# Altium footprint library SamacSys.PcbLib: 1008 footprints (part 41 of 63)
Each footprint in its own frame and in the unit in brackets; x right, y up, seen from the top. Pads: shape width x height; smd on the part's side, far side on the other; paste and mask are expansions set on the pad; w line width, h text height; cw(c..) or ccw(c..) is an arc to the next point about the centre after c.
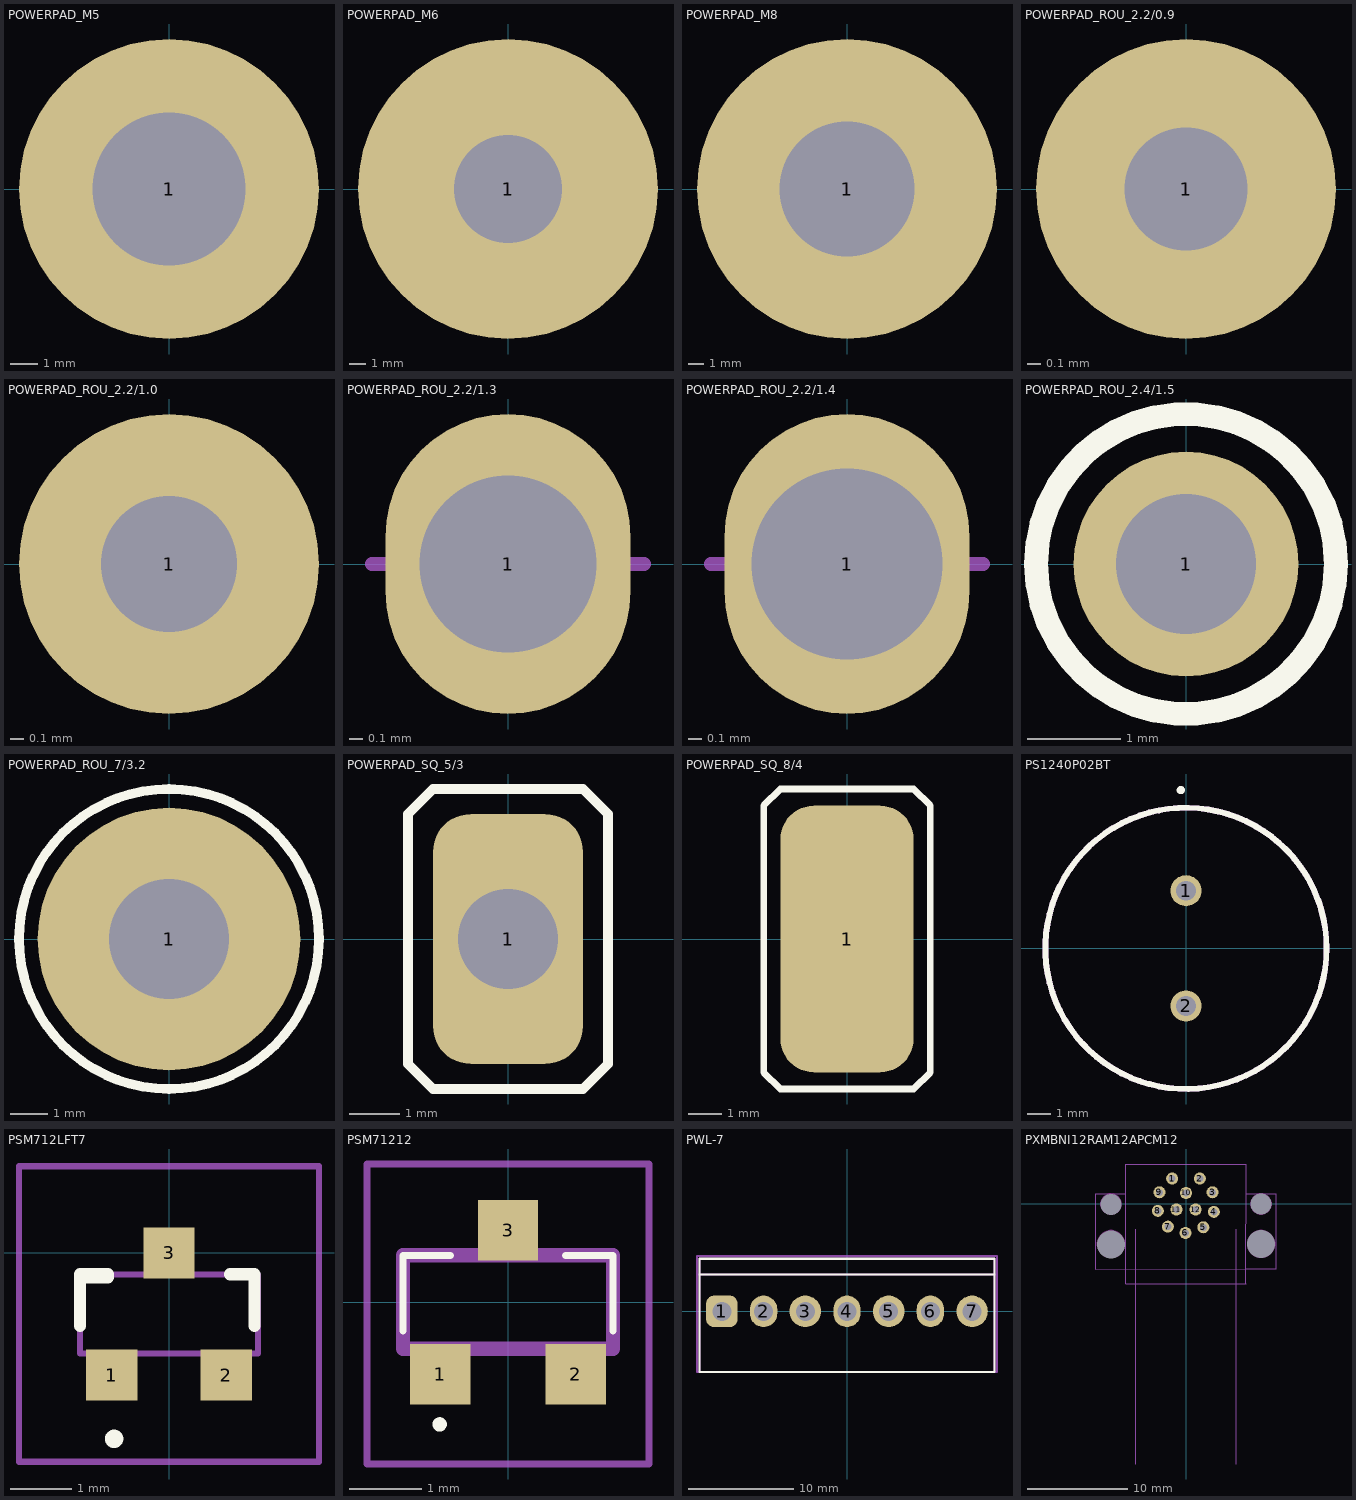
[diagram p40: the footprints below, top view; thin cyan lines are the x and y axes]

## POWERPAD_M5 [mm]
pads (1):
  round 11 hole 5.6 mask+0.5: 1(0,0)
Countryard:
  lines w0.1: -1,0 1,0 ; 0,-1 0,1
3D body: height 42, standoff 35, extent -5,-22.5 5,6.5
3D body: height 57, standoff -13, extent -2.489,-2.477 2.511,2.523

## POWERPAD_M6 [mm]
pads (1):
  round 18 hole 6.5 mask+0.5: 1(0,0)
Countryard:
  lines w0.1: -1,0 1,0 ; 0,-1 0,1
3D body "м6.STEP": height 62.94, standoff -17.06, extent -6,-6 6,5.976

## POWERPAD_M8 [mm]
pads (1):
  round 20 hole 9 mask+0.5: 1(0,0)
Countryard:
  lines w0.1: -1,0 1,0 ; 0,-1 0,1
3D body "м8.STEP": height 62.94, standoff -17.06, extent -8,-8 8,7.977
3D body "Cable Lug M8.step": height 54.7, standoff 40, extent -11.479,-9 35.5,9

## POWERPAD_ROU_2.2/0.9 [mm]
pads (1):
  round 2.2 hole 0.9: 1(0,0)
Countryard:
  lines w0.1: -1,0 1,0 ; 0,-1 0,1

## POWERPAD_ROU_2.2/1.0 [mm]
pads (1):
  round 2.2 hole 1: 1(0,0)
Countryard:
  lines w0.1: -1,0 1,0 ; 0,-1 0,1

## POWERPAD_ROU_2.2/1.3 [mm]
pads (1):
  oval 1.8x2.2 hole 1.3: 1(0,0)
Countryard:
  lines w0.1: -1,0 1,0 ; 0,-1 0,1

## POWERPAD_ROU_2.2/1.4 [mm]
pads (1):
  oval 1.8x2.2 hole 1.4: 1(0,0)
Countryard:
  lines w0.1: -1,0 1,0 ; 0,-1 0,1

## POWERPAD_ROU_2.4/1.5 [mm]
pads (1):
  round 2.4 hole 1.5: 1(0,0)
Top Overlay:
  circle w0.254: c0,0 r1.603
Countryard:
  lines w0.1: -1,0 1,0 ; 0,-1 0,1

## POWERPAD_ROU_7/3.2 [mm]
pads (1):
  round 7 hole 3.2: 1(0,0)
Top Overlay:
  circle w0.254: c0,0 r4
Countryard:
  lines w0.1: -1,0 1,0 ; 0,-1 0,1

## POWERPAD_SQ_5/3 [mm]
pads (1):
  rrect50% 3x5 hole 2: 1(0,0)
Top Overlay:
  lines w0.2: -2,-2.5 -2,2.5 -1.5,3 1.5,3 2,2.5 2,-2.5 1.5,-3 -1.5,-3 -2,-2.5
Countryard:
  lines w0.1: -1,0 1,0 ; 0,-1 0,1

## POWERPAD_SQ_8/4 [mm]
pads (1):
  rrect50% 4x8 smd: 1(0,0)
Top Overlay:
  lines w0.2: -2.5,-4 -2.5,-3.5 -2.5,4 -2,4.5 2,4.5 2.5,4 2.5,-3.5 2.5,-4 2,-4.5 -2,-4.5 -2.5,-4
Countryard:
  lines w0.1: -1,0 1,0 ; 0,-1 0,1

## PS1240P02BT [mm]
pads (2):
  round 1.35 hole 0.85: 1(0,2.5) 2(0,-2.5)
Top Overlay:
  circle w0.254: c0,0 r6.1
  circle w0.254: c-0.228,6.861 r0.05
Assembly:
  circle w0.254: c0,0 r6.1
3D body "PS1240P02BT.stp": height 7.11, standoff -14.89, extent -6.1,-6.058 6.1,6.118

## PSM712LFT7 [mm]
pads (3):
  rect 0.84x0.84 smd: 1(-0.94,-2.005) 2(0.94,-2.005) 3(0,0)
Top Overlay:
  lines w0.2: -1.46,-0.4 -1.46,-1.2 -1.46,-0.4 ; -1.46,-0.4 -1.46,-0.352 -1,-0.352 -1,-0.4 -1.46,-0.4 ; -0.9,-3.1 ccw(c-0.9,-3.05) -0.9,-3 ; -0.9,-3.1 cw(c-0.9,-3.05) -0.9,-3 ; -0.9,-3.1 ccw(c-0.9,-3.05) -0.9,-3 ; 1.4,-0.352 1.4,-1.2 1.4,-0.352 ; 1.4,-0.352 1,-0.352 1.4,-0.352
Assembly:
  lines w0.1: -1.46,-1.652 -1.46,-0.352 1.46,-0.352 1.46,-1.652 -1.46,-1.652
Countryard:
  lines w0.1: -2.46,-3.425 -2.46,1.42 2.46,1.42 2.46,-3.425 -2.46,-3.425
3D body "PSM712-LF-T7.stp": height 1.09, standoff 0.02, extent -1.449,-2.1 1.449,0.2

## PSM71212 [mm]
pads (3):
  rect 0.84x0.84 smd: 1(-0.94,-1) 2(0.94,-1) 3(0,1)
Top Overlay:
  lines w0.1: -1.46,-0.4 -1.46,0.65 -0.8,0.65 ; 0.8,0.65 1.46,0.65 1.46,-0.4 ; -1,-1.7 ccw(c-0.95,-1.7) -0.9,-1.7 ccw(c-0.95,-1.7) -1,-1.7
Assembly:
  lines w0.2: -1.46,-0.65 -1.46,0.65 1.46,0.65 1.46,-0.65 -1.46,-0.65
Countryard:
  lines w0.1: -1.96,-2.25 -1.96,1.92 1.96,1.92 1.96,-2.25 -1.96,-2.25
3D body "PSM712-12.stp": height 1.31, standoff 0, extent -1.46,-1.336 1.46,1.336

## PWL-7 [mm]
pads (7):
  rrect50% 3x3 hole 1.8: 1(-11.88,0)
  oval 2.6x3 hole 1.8: 2(-7.92,0) 4(0,0) 6(7.92,0)
  round 3 hole 1.8: 3(-3.96,0) 5(3.96,0) 7(11.88,0)
Top Overlay:
  lines w0.2: -14,3.5 14,3.5 ; -14,-5.75 -14,5 14,5 14,-5.75 -14,-5.75
Top Assembly:
  lines w0.2: -14.25,3.5 14.25,3.5 ; -14.25,-5.75 -14.25,5.25 14.25,5.25 14.25,-5.75 -14.25,-5.75
Countryard:
  lines w0.2: -14,-5.75 14,-5.75 14,5 -14,5 -14,-5.75
3D body "User Library-PWL-7.step": height 13.8, standoff -3.6, extent -13.86,-5.588 13.86,4.812

## PXMBNI12RAM12APCM12 [mm] "Bulgin 12 pin IP67"
height 16
pads (16):
  round 1.2 hole 0.7: 1(-1.384,2.549) 2(1.384,2.549) 3(2.652,1.174) 4(2.791,-0.787) 5(1.73,-2.327) 6(-0.051,-2.9) 7(-1.81,-2.266) 8(-2.817,-0.689) 9(-2.652,1.174) 10(0,1.1) 11(-0.953,-0.55) 12(0.953,-0.55)
  round 1.2 hole 2.1 unplated: MNT1(7.5,0) MNT2(-7.5,-0.026)
  round 1.2 hole 2.8 unplated: MNT3(7.5,-4) MNT4(-7.5,-4.026)
Keep-Out Layer:
  board cut-out: 6.1,-4 6.1,-3.862 6.154,-3.592 6.259,-3.337 6.413,-3.108 6.608,-2.913 6.837,-2.759 7.092,-2.654 7.362,-2.6 7.5,-2.6 7.638,-2.6 7.908,-2.654 8.163,-2.759 8.392,-2.913 8.587,-3.108 8.741,-3.337 8.846,-3.592 8.9,-3.862 8.9,-4 8.9,-4.138 8.846,-4.408 8.741,-4.663 8.587,-4.892 8.392,-5.087 8.163,-5.241 7.908,-5.346 7.638,-5.4 7.5,-5.4 7.362,-5.4 7.092,-5.346 6.837,-5.241 6.608,-5.087 6.413,-4.892 6.259,-4.663 6.154,-4.408 6.1,-4.138
  board cut-out: 6.45,0 6.45,-0.103 6.49,-0.306 6.57,-0.497 6.684,-0.669 6.831,-0.816 7.003,-0.93 7.194,-1.01 7.397,-1.05 7.5,-1.05 7.603,-1.05 7.806,-1.01 7.997,-0.93 8.169,-0.816 8.316,-0.669 8.43,-0.497 8.51,-0.306 8.55,-0.103 8.55,0 8.55,0.103 8.51,0.306 8.43,0.497 8.316,0.669 8.169,0.816 7.997,0.93 7.806,1.01 7.603,1.05 7.5,1.05 7.397,1.05 7.194,1.01 7.003,0.93 6.831,0.816 6.684,0.669 6.57,0.497 6.49,0.306 6.45,0.103
  board cut-out: -6.1,-4 -6.1,-3.862 -6.154,-3.592 -6.259,-3.337 -6.413,-3.108 -6.608,-2.913 -6.837,-2.759 -7.092,-2.654 -7.362,-2.6 -7.5,-2.6 -7.638,-2.6 -7.908,-2.654 -8.163,-2.759 -8.392,-2.913 -8.587,-3.108 -8.741,-3.337 -8.846,-3.592 -8.9,-3.862 -8.9,-4 -8.9,-4.138 -8.846,-4.408 -8.741,-4.663 -8.587,-4.892 -8.392,-5.087 -8.163,-5.241 -7.908,-5.346 -7.638,-5.4 -7.5,-5.4 -7.362,-5.4 -7.092,-5.346 -6.837,-5.241 -6.608,-5.087 -6.413,-4.892 -6.259,-4.663 -6.154,-4.408 -6.1,-4.138
  board cut-out: -6.45,0 -6.45,-0.103 -6.49,-0.306 -6.57,-0.497 -6.684,-0.669 -6.831,-0.816 -7.003,-0.93 -7.194,-1.01 -7.397,-1.05 -7.5,-1.05 -7.603,-1.05 -7.806,-1.01 -7.997,-0.93 -8.169,-0.816 -8.316,-0.669 -8.43,-0.497 -8.51,-0.306 -8.55,-0.103 -8.55,0 -8.55,0.103 -8.51,0.306 -8.43,0.497 -8.316,0.669 -8.169,0.816 -7.997,0.93 -7.806,1.01 -7.603,1.05 -7.5,1.05 -7.397,1.05 -7.194,1.01 -7.003,0.93 -6.831,0.816 -6.684,0.669 -6.57,0.497 -6.49,0.306 -6.45,0.103
Top Assembly:
  lines w0.1: -6,1 -9,1 -9,-6.5 6,-6.5 9,-6.5 9,1 6,1 ; -5,-26 -5,-2.5 ; 5,-26 5,-2.5 ; -6,-8 6,-8 6,4 -6,4 -6,-8